# Altium schematic symbol library Screw.SchLib: 4 symbols
Pins are listed as number, name and electrical type; pins without a type are passive.

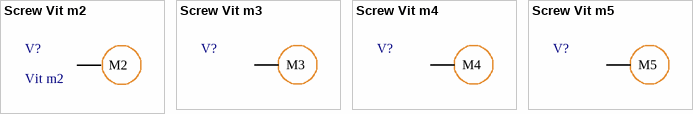
[diagram p0: symbols Screw Vit m2 to Screw Vit m5]

## Screw Vit m2
designator V?, comment Vit m2  (no BOM)
Screw Vit 2mm; Code: N/A
footprint Screw 2mm (Hole 2.1mm)
footprint Screw 2mm - VIA (Hole 2.1mm)
footprint Screw 2mm + 20% (Hole 2.1mm)
footprint Screw 2mm - VIA +20% (Hole 2.1mm)
pins: 1 M2

## Screw Vit m3
designator V?, comment Vit m3  (value not drawn)  (no BOM)
Screw Vit m3; Code: N/A
footprint Screw 3.0 (Hole 3.0mm)
footprint Screw M3x5 (Hole 3.0mm)
footprint Screw M3x5 - Via (Hole 3.0mm)
footprint Screw M3x5 crescent (Hole 3.0mm)
footprint Screw M3x5 +20% (Hole 3.0mm)
footprint Screw M3x5 - Via +20% (Hole 3.0mm)
footprint Screw M3x5 crescent +20% (Hole 3.0mm)
footprint Screw 3.0 +20% (Hole 3.0mm)
pins: 1 M3

## Screw Vit m4
designator V?, comment Vit M4  (value not drawn)  (no BOM)
Screw Vit M4 4mn; Code: N/A
footprint Screw 4.2 mm x 5mm (Hole 4.2 mm)
footprint Screw 4.2 mm x 5mm - Via (Hole 4.2 mm)
footprint Screw 4.2 mm x 5mm +20% (Hole 4.2 mm)
footprint Screw 4.2 mm x 5mm - Via +20% (Hole 4.2 mm)
pins: 1 M4

## Screw Vit m5
designator V?, comment Vit M5  (value not drawn)  (no BOM)
Screw Vit M5 4mm; Code: N/A
footprint Screw 5.2 mm x 5mm - Via +20% (Hole 4.2 mm)
pins: 1 M5